# Altium schematic symbol library PTD904-2015Kc104.SchLib: 1 symbol
Pins are listed as number, name and electrical type; pins without a type are passive.

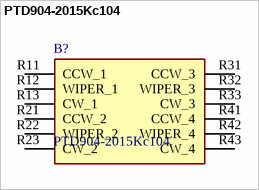
[diagram p0: symbol PTD904-2015Kc104]

## PTD904-2015Kc104
designator B?
Potentiometer 4 Gang 100 kOhms 25 mW; Manufacturer_Name: Bourns; Geometry.Height: 11.9mm; Manufacturer_Part_Number: PTD904-2015Kc104; Mouser Part Number: 652-PTD9042015KC104; Mouser Price/Stock: https://www.mouser.co.uk/ProductDetail/Bourns/PTD904-2015Kc104?qs=5lbl9CW7Yx%252BG%252B7znTmxxmQ%3D%3D; Arrow Part Number: *; Arrow Price/Stock: *; Datasheet Link: https://www.mouser.com/datasheet/2/54/ptd90-777943.pdf
footprint PTD9042015Kc104
pins: R11 CCW_1, R12 WIPER_1, R13 CW_1, R21 CCW_2, R22 WIPER_2, R23 CW_2, R31 CCW_3, R32 WIPER_3, R33 CW_3, R41 CCW_4, R42 WIPER_4, R43 CW_4